# Altium schematic symbol library 54602-908LF.SchLib: 2 symbols
Pins are listed as number, name and electrical type; pins without a type are passive.

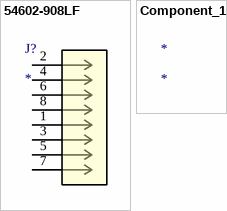
[diagram p0: symbols 54602-908LF to Component_1]

## 54602-908LF
designator J?
No Description Available; Mfr_Name: Amphenol ICC; RefDes: RefDes; Type: Type
footprint CONN8_2-908LF_AMP
pins: 1, 2, 3, 4, 5, 6, 7, 8

## Component_1
designator *